# Altium footprint library BAT-HLD-001-THM.PCBLIB: 1 footprints
Each footprint in its own frame and in the unit in brackets; x right, y up, seen from the top. Pads: shape width x height; smd on the part's side, far side on the other; paste and mask are expansions set on the pad; w line width, h text height; cw(c..) or ccw(c..) is an arc to the next point about the centre after c.
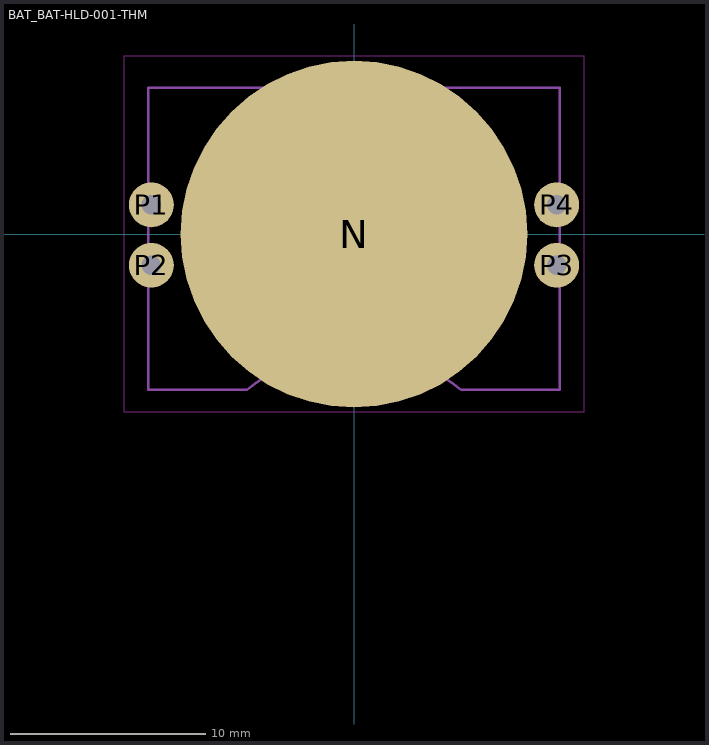
[diagram p0: the footprint, top view; thin cyan lines are the x and y axes]

## BAT_BAT-HLD-001-THM [mm]
pads (5):
  rrect100% 17.8x17.8 smd paste+0: N(0,0)
  round 2.3 hole 1: P1(-10.4,1.5) P2(-10.4,-1.6) P3(10.4,-1.6) P4(10.4,1.5)
Top keep-out:
  lines w0.05: -11.8,-9.15 11.8,-9.15 11.8,9.15 -11.8,9.15 -11.8,-9.15
tDocu:
  lines w0.127: -10.55,-8 -5.5,-8 cw(c0.07,-14.757) 0,-6 cw(c-0.07,-14.757) 5.5,-8 10.55,-8 10.55,7.5 -10.55,7.5 -10.55,-8
tPlace:
  lines w0.127: -10.55,-3.07 -10.55,-8 -5.5,-8 ; -10.55,2.97 -10.55,7.5 -6,7.5 ; 5.5,-8 10.55,-8 10.55,-3.07 ; 6,7.5 10.55,7.5 10.55,2.97